# Altium schematic symbol library data_logger_Schlib.SchLib: 15 symbols
Pins are listed as number, name and electrical type; pins without a type are passive.

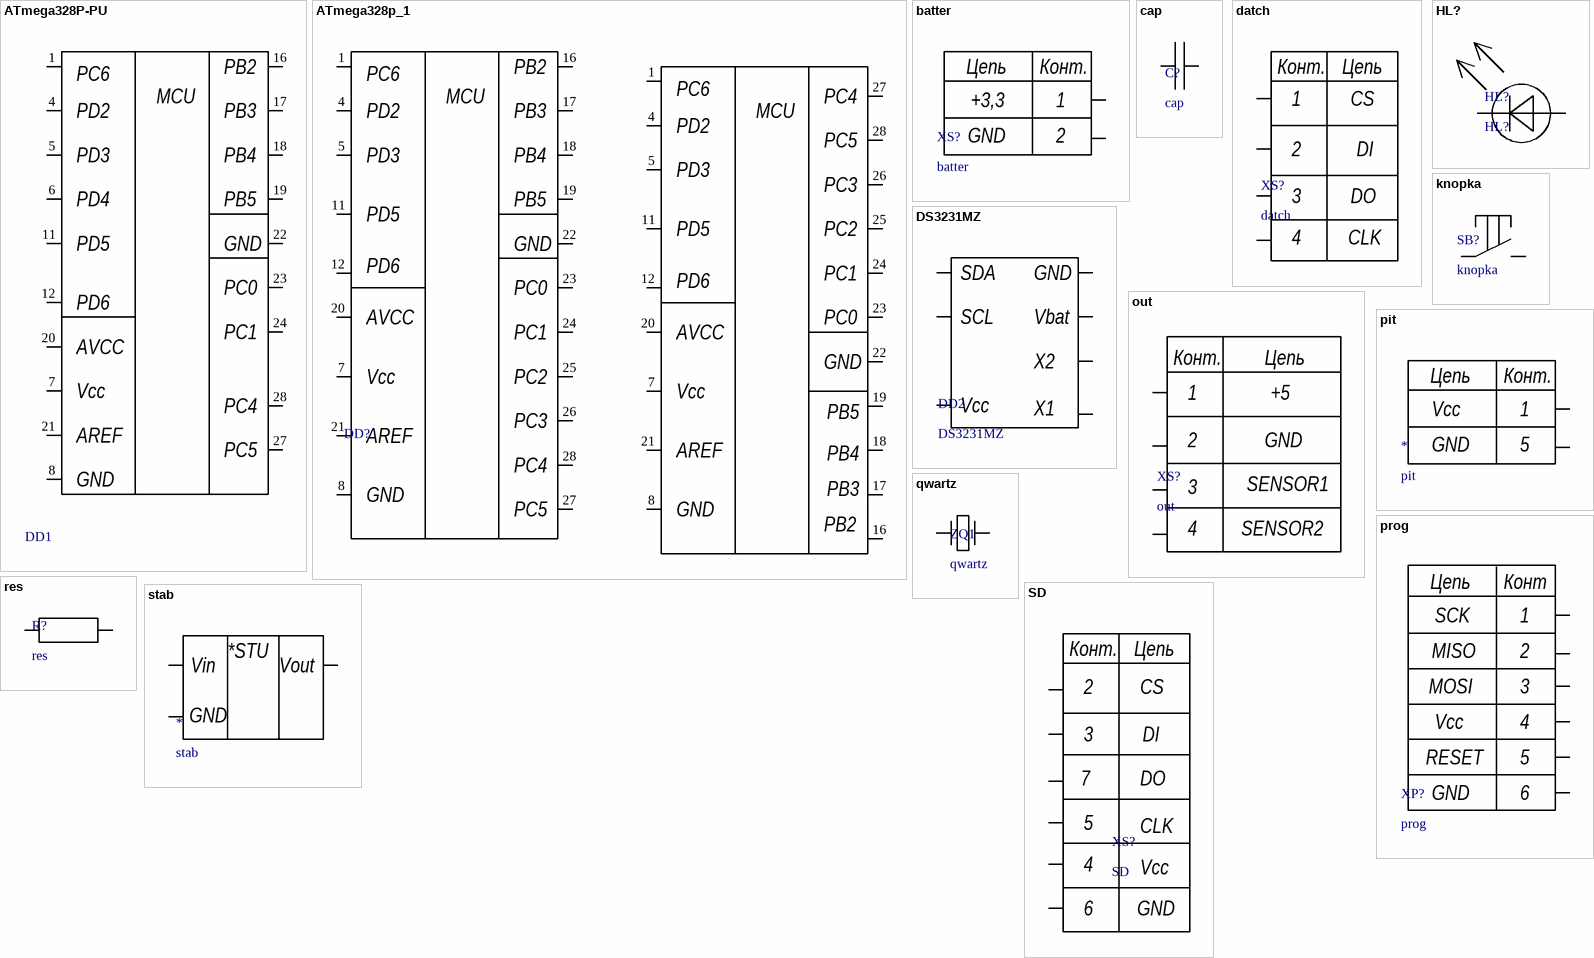
[diagram p0: symbols ATmega328P-PU to stab]

## ATmega328P-PU
designator DD1  (value not drawn)
footprint ATmega328P-PU
pins: 1 4, 4, 5 29, 6 29, 7 4, 8 4, 11 4, 12 4, 16 32, 17 31, 18 30, 19 29, 20 4, 21 4, 22 28, 23 27, 24 26, 27 23, 28 22
text: PB2; PC6; MCU; PD2; PB3; PD3; PB4; PD4; PB5; PD5; GND; PC0; PD6; PC1; AVCC; Vcc; PC4; AREF; PC5

## ATmega328p_1
designator DD?  (value not drawn)
footprint ATmega328P-PU
pins: 1 4, 1 4, 4, 4, 5 29, 5 29, 7 4, 7 4, 8 4, 8 4, 11 4, 11 4, 12 4, 12 4, 16 32, 16 32, 17 31, 17 31, 18 30, 18 30, 19 29, 19 29, 20 4, 20 4, 21 4, 21 4, 22 28, 22 28, 23 27, 23 27, 24 26, 24 26, 25, 25, 26 24, 26 24, 27 23, 27 23, 28 22, 28 22
text: PB2; PC6; MCU; PC4; PD2; PB3; PC5; PD3; PB4; PC3; PB5; PD5; PC2; GND; PD6; PC1; PC0; AVCC; Vcc; AREF

## batter
designator XS?
footprint BAT
pins: N 53, P 52
text: Цепь; Конт.; +3,3; 1; GND; 2

## cap
designator C?
footprint SMDcap (Chip Resistor, 2-Leads, Body 3,20x1,60mm, IPC Low Density)
pins: 1 12, 2 13

## datch
designator XS?
pins: 1 46, 2 47, 3 48, 4 49
text: Конт.; Цепь; CS; DI; DO; CLK

## DS3231MZ
designator DD2
footprint realt
pins: 1 37, 2 38, 3 39, 4 40, 5 36, 6 35, 8 33
text: SDA; GND; SCL; Vbat; X2; Vcc; X1

## HL?
designator HL?
footprint SMDLED
pins: A 17, C 16

## knopka
designator SB?
footprint smdknop
pins: 1 15, 2 14

## out
designator XS?
footprint dat
pins: 1 47, 2 46, gnd 47, vcc 47
text: Конт.; Цепь; +5; GND; 3; SENSOR1; 4; SENSOR2

## pit
designator *
footprint pit usb
pins: 1 52, 5 53
text: Цепь; Конт.; Vcc; GND

## prog
designator XP?
footprint prog
pins: 1 52, 2 53, 3 6, 4 7, 5 8, 6 9
text: Цепь; Конт; SCK; MISO; MOSI; Vcc; RESET; GND

## qwartz
designator ZQ1
footprint smdqwartz
pins: 1 45, 2 44

## res
designator R?
footprint SMDRES (Chip Resistor, 2-Leads, Body 3,20x1,60mm, IPC Low Density)
pins: 1 11, 2 10

## SD
designator XS?
footprint SDcard
pins: 2 46, 3 47, 4 50, 5 49, 6 51, 7 48
text: Конт.; Цепь; CS; DI; DO; CLK; Vcc; GND

## stab
designator *
footprint stab
pins: 1 41, 2 43, 3 42
text: *STU; Vin; Vout; GND